# Altium schematic symbol library M20-7820442.SchLib: 1 symbol
Pins are listed as number, name and electrical type; pins without a type are passive.

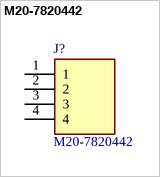
[diagram p0: symbol M20-7820442]

## M20-7820442
designator J?
M20: 4 Pos Receptacle SIL Straight 3mm THT Connector 8.5mm high Gold+Tin; Manufacturer_Name: Harwin; Mouser Part Number: 855-M20-7820442; Mouser Price/Stock: https://www.mouser.co.uk/ProductDetail/Harwin/M20-7820442?qs=vF78I%252BjhbY9ZgDLCXkGx4w%3D%3D; Manufacturer_Part_Number: M20-7820442; Datasheet Link: https://content.harwin.com/m/c2ac50ebb1c800d5/original/DRG-00385-Technical-Drawing-Datasheet-M20-782-pdf.pdf; Geometry.Height: 8.5mm
footprint RHDR4W70P0X254_1X4_1056X250X850P
pins: 1, 2, 3, 4